# Altium footprint library Generic.PcbLib: 8 footprints
Each footprint in its own frame and in the unit in brackets; x right, y up, seen from the top. Pads: shape width x height; smd on the part's side, far side on the other; paste and mask are expansions set on the pad; w line width, h text height; cw(c..) or ccw(c..) is an arc to the next point about the centre after c.
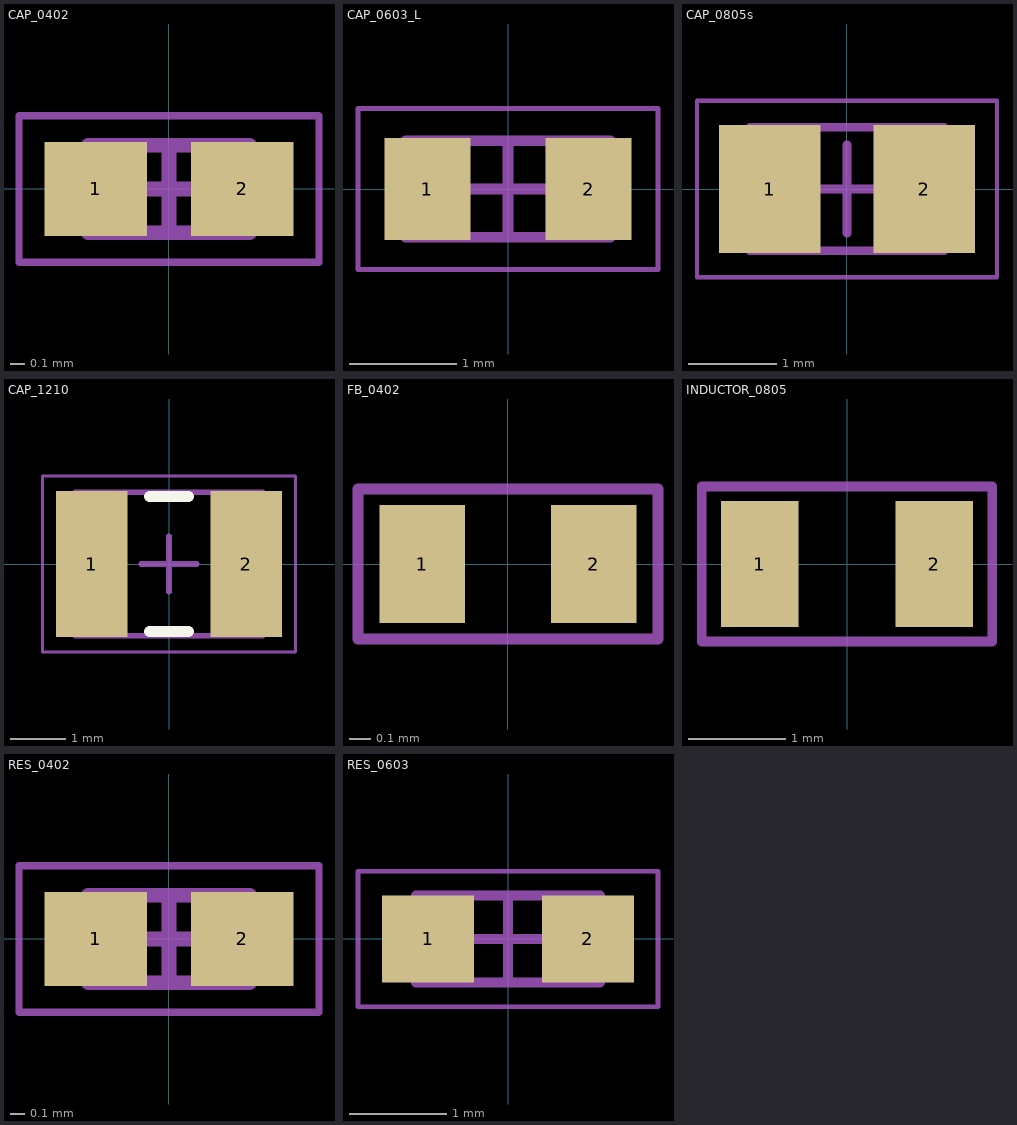
[diagram p0: the footprints below, top view; thin cyan lines are the x and y axes]

## CAP_0402 [mm] "generic 0402 cap footprint"
height 0.8
pads (2):
  rect 0.7x0.64 smd mask+0.05: 1(-0.5,0) 2(0.5,0)
Mechanical 13:
  lines w0.1: -0.55,-0.3 0.55,-0.3 0.55,0.3 -0.55,0.3 -0.55,-0.3
Mechanical 15:
  lines w0.05: -1.025,-0.5 1.025,-0.5 1.025,0.5 -1.025,0.5 -1.025,-0.5
  lines w0.1: -0.3,0 0.3,0 ; 0,-0.3 0,0.3
3D body: height 0.6, standoff 0, extent 0.32,-0.3 0.55,0.3
3D body: height 0.6, standoff 0, extent -0.55,-0.3 -0.32,0.3
3D body: height 0.6, standoff 0, extent -0.32,-0.3 0.32,0.3

## CAP_0603_L [mm] "generic, 0.1mm longer (max pad-to-pad) for better hand-solderability"
height 0.8
pads (2):
  rect 0.8x0.95 smd mask+0.05: 1(-0.75,0) 2(0.75,0)
Mechanical 13:
  lines w0.1: -0.95,-0.45 -0.95,0.45 0.95,0.45 0.95,-0.45 -0.95,-0.45
Mechanical 15:
  lines w0.05: -1.397,-0.75 1.397,-0.75 1.397,0.75 -1.397,0.75 -1.397,-0.75
  lines w0.1: -0.45,0 0.45,0 ; 0,-0.45 0,0.45
3D body: height 0.8, standoff 0, extent -0.6,-0.45 0.6,0.45
3D body: height 0.8, standoff 0, extent -0.95,-0.45 -0.6,0.45
3D body: height 0.8, standoff 0, extent 0.6,-0.45 0.95,0.45

## CAP_0805s [mm] "Chip Capacitor, 2-Leads, Body 2,00x1,25mm, IPC Medium Density"
height 0.55
pads (2):
  rect 1.15x1.45 smd mask+0.035: 1(-0.875,0) 2(0.875,0)
Mechanical 13:
  lines w0.1: -1.1,-0.7 -1.1,0.7 1.1,0.7 1.1,-0.7 -1.1,-0.7
Mechanical 15:
  lines w0.05: -1.7,-1 -1.7,1 1.7,1 1.7,-1 -1.7,-1
  lines w0.1: -0.5,0 0.5,0 ; 0,-0.5 0,0.5
3D body: height 1.25, standoff 0, extent -0.65,-0.7 0.65,0.7
3D body: height 1.25, standoff 0, extent -1.1,-0.7 -0.65,0.7
3D body: height 1.25, standoff 0, extent 0.65,-0.7 1.1,0.7

## CAP_1210 [mm] "Chip Capacitor, 2-Leads, Body 3,20x2,5mm, IPC Medium Density"
height 2.6
pads (2):
  rect 1.3x2.65 smd: 1(-1.4,0) 2(1.4,0)
Top Overlay:
  lines w0.2: -0.35,-1.225 0.35,-1.225 ; -0.35,1.225 0.35,1.225
Mechanical 13:
  lines w0.1: -1.7,-1.3 -1.7,1.3 1.7,1.3 1.7,-1.3 -1.7,-1.3
Mechanical 15:
  lines w0.05: -2.3,-1.6 -2.3,1.6 2.3,1.6 2.3,-1.6 -2.3,-1.6
  lines w0.1: -0.5,0 0.5,0 ; 0,-0.5 0,0.5
3D body: height 2.6, standoff 0, extent -1.2,-1.3 1.2,1.3
3D body: height 2.6, standoff 0, extent -1.7,-1.3 -1.2,1.3
3D body: height 2.6, standoff 0, extent 1.2,-1.3 1.7,1.3

## FB_0402 [mm] "Chip Inductor, 2-Leads, Body 1,00x0,50mm, IPC Medium Density"
height 0.55
pads (2):
  rect 0.4x0.55 smd mask+0.04: 1(-0.4,0) 2(0.4,0)
Mechanical 15:
  lines w0.05: -0.7,-0.35 0.7,-0.35 0.7,0.35 -0.7,0.35 -0.7,-0.35
3D body "FB 0402.step": height 0.5, standoff 0, extent -0.5,-0.25 0.5,0.25

## INDUCTOR_0805 [mm] "Generic inductor (L) 0805"
pads (2):
  rect 0.8x1.3 smd mask+0.04: 1(-0.9,0) 2(0.9,0)
Mechanical 15:
  lines w0.1: -1.5,-0.8 1.5,-0.8 1.5,0.8 -1.5,0.8 -1.5,-0.8
3D body "MLZ2012M150WT000.step": height 1.25, standoff 0, extent -1,-0.625 1,0.625

## RES_0402 [mm] "0402 Chip Resistor, 2-Leads, Body 1,00x0,5mm, IPC Medium Density"
height 0.4
pads (2):
  rect 0.7x0.64 smd mask+0.04: 1(-0.5,0) 2(0.5,0)
Mechanical 13:
  lines w0.1: -0.55,-0.3 0.55,-0.3 0.55,0.3 -0.55,0.3 -0.55,-0.3
Mechanical 15:
  lines w0.05: -1.025,-0.5 1.025,-0.5 1.025,0.5 -1.025,0.5 -1.025,-0.5
  lines w0.1: -0.3,0 0.3,0 ; 0,-0.3 0,0.3
3D body: height 0.4, standoff 0, extent 0.32,-0.3 0.55,0.3
3D body: height 0.4, standoff 0, extent -0.55,-0.3 -0.32,0.3
3D body: height 0.4, standoff 0, extent -0.32,-0.3 0.32,0.3

## RES_0603 [mm] "0603 Chip Resistor, 2-Leads, Body 1,85x1,05mm, IPC Medium Density"
height 0.46
pads (2):
  rect 0.95x0.9 smd mask+0.05: 1(-0.825,0) 2(0.825,0)
Mechanical 13:
  lines w0.1: -0.95,-0.45 0.95,-0.45 0.95,0.45 -0.95,0.45 -0.95,-0.45
Mechanical 15:
  lines w0.05: -1.55,-0.7 1.55,-0.7 1.55,0.7 -1.55,0.7 -1.55,-0.7
  lines w0.1: -0.45,0 0.45,0 ; 0,-0.45 0,0.45
3D body: height 0.8, standoff 0, extent 0.6,-0.45 0.95,0.45
3D body: height 0.8, standoff 0, extent -0.95,-0.45 -0.6,0.45
3D body: height 0.8, standoff 0, extent -0.6,-0.45 0.6,0.45